# Altium schematic symbol library Thunderbolt GPIO.SCHLIB: 6 symbols
Pins are listed as number, name and electrical type; pins without a type are passive.

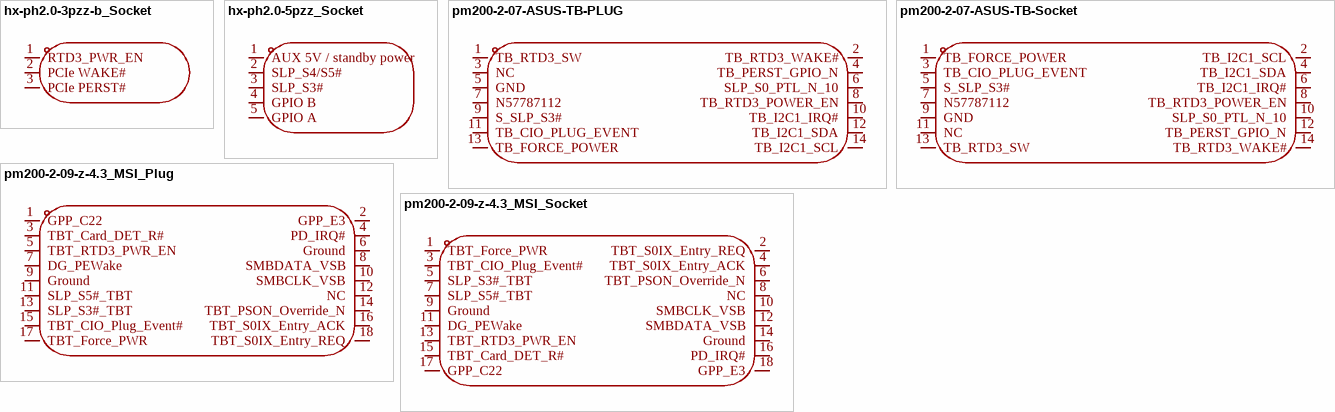
[diagram p0: symbols hx-ph2.0-3pzz-b_Socket to pm200-2-09-z-4.3_MSI_Socket]

## hx-ph2.0-3pzz-b_Socket
designator CN??, comment hx-ph2.0-3pzz-b  (value not drawn)
插针结构:1x3P;间距:2mm;安装方式:直插;参考系列:PH;总PIN数:3P;排数:1;每排PIN数:3;行距:-;额定电流:2A;触头材质:黄铜;触头镀层:锡;工作温度:-25℃~+85℃;; Manufacturer: hanxia(韩下); AddInBom: yes; Pins Structure: 1x3P; Pitch: 2mm; Reference Series: PH; Number of PINs Per Row: 3; Current Rating: 2A; Voltage Rating: 250V; Plastic Material: PA66; Flame Retardant Rating: UL94V-0; Symbol: HX-PH2.0-3PZZ-B; LCSC Part Name: 1x3P 间距:2mm 直插 系列:PH; SupplierPart: C49009993; ManufacturerPart: HX-PH2.0-3PZZ-B; Supplier Footprint: 插件,P=2mm; JLCPCB Part Class: Extended Part; Datasheet: https://item.szlcsc.com/datasheet/HX-PH2.0-3PZZ-B/51365914.html; Supplier: LCSC; ConvertToPcb: yes; FootprintName: CONN-TH_HX-PH2.0-3PZZ-B; Mounting Type: 直插; Number of Pins: 3P; Number of Rows: 1; Row Spacing: -; Contact Material: 黄铜; Contact Plating: 锡; Operating Temperature: -25℃~+85℃; Supplementary Features: -; Color: 黑色; Z-Height of the Board: -; X-Length of Bottom Edge on Board (Spacing Line): -; Y-Width of Bottom Edge on Board: -
footprint CONN-TH_HX-PH2.0-3PZZ-B
pins: 1 RTD3_PWR_EN, 2 PCIe WAKE#, 3 PCIe PERST#

## hx-ph2.0-5pzz_Socket
designator CN??, comment hx-ph2.0-5pzz  (value not drawn)
插针结构:1x5P;间距:2mm;安装方式:直插;参考系列:PH;总PIN数:5P;排数:1;每排PIN数:5;行距:-;额定电流:2A;触头材质:黄铜;触头镀层:锡;工作温度:-25℃~+85℃;; Manufacturer: hanxia(韩下); AddInBom: yes; Pins Structure: 1x5P; Pitch: 2mm; Reference Series: PH; Number of PINs Per Row: 5; Current Rating: 2A; Voltage Rating: 250V; Plastic Material: PA66; Flame Retardant Rating: UL94V-0; Symbol: HX-PH2.0-5PZZ; LCSC Part Name: 1x5P 间距:2mm 直插 系列:PH; SupplierPart: C48641620; ManufacturerPart: HX-PH2.0-5PZZ; Supplier Footprint: 插件,P=2mm; JLCPCB Part Class: Extended Part; Datasheet: https://item.szlcsc.com/datasheet/HX-PH2.0-5PZZ/50919866.html; Supplier: LCSC; ConvertToPcb: yes; FootprintName: CONN-TH_HX-PH2.0-5PZZ; Mounting Type: 直插; Number of Pins: 5P; Number of Rows: 1; Row Spacing: -; Contact Material: 黄铜; Contact Plating: 锡; Operating Temperature: -25℃~+85℃; Color: 白色
footprint CONN-TH_HX-PH2.0-5PZZ
pins: 1 AUX 5V / standby power, 2 SLP_S4/S5#, 3 SLP_S3#, 4 GPIO B, 5 GPIO A

## pm200-2-07-ASUS-TB-PLUG
designator U??, comment pm200-2-07-s-4.3  (value not drawn)
插孔结构:2x7P;间距:2mm;行距:2mm;圆孔/方孔:方孔;安装方式:立贴;排数:双排;总孔位数:14P;额定电流:1.5A;插孔方向:顶部;塑高:4.3mm;触头材质:黄铜;工作温度:-40℃~+105℃;; Manufacturer: HCTL(华灿天禄); AddInBom: yes; Holes Structure: 2x7P; Pitch: 2mm; Circular Hole / Square Hole: 方孔; Number of Positions: 14P; Current Rating: 1.5A; Holes Direction: 顶部; Symbol: PM200-2-07-S-4.3; LCSC Part Name: 2x7P 间距:2mm 立贴; SupplierPart: C3975171; ManufacturerPart: PM200-2-07-S-4.3; Supplier Footprint: SMD,P=2mm; JLCPCB Part Class: Extended Part; Datasheet: https://item.szlcsc.com/datasheet/PM200-2-07-S-4.3/4543722.html; Supplier: LCSC; ConvertToPcb: yes; FootprintName: HDR-SMD_14P-P2.00-V-F-R2-C7-LS6.5-A; Row Spacing: 2mm; Mounting Type: 立贴; Number of Rows: 双排; Insulation Height: 4.3mm; Contact Material: 黄铜; Operating Temperature: -40℃~+105℃
footprint HDR-SMD_14P-P2.00-V-F-R2-C7-LS6.5-A
pins: 1 TB_RTD3_SW, 2 TB_RTD3_WAKE#, 3 NC, 4 TB_PERST_GPIO_N, 5 GND, 6 SLP_S0_PTL_N_10, 7 N57787112, 8 TB_RTD3_POWER_EN, 9 S_SLP_S3#, 10 TB_I2C1_IRQ#, 11 TB_CIO_PLUG_EVENT, 12 TB_I2C1_SDA, 13 TB_FORCE_POWER, 14 TB_I2C1_SCL

## pm200-2-07-ASUS-TB-Socket
designator U??, comment pm200-2-07-s-4.3  (value not drawn)
插孔结构:2x7P;间距:2mm;行距:2mm;圆孔/方孔:方孔;安装方式:立贴;排数:双排;总孔位数:14P;额定电流:1.5A;插孔方向:顶部;塑高:4.3mm;触头材质:黄铜;工作温度:-40℃~+105℃;; Manufacturer: HCTL(华灿天禄); AddInBom: yes; Holes Structure: 2x7P; Pitch: 2mm; Circular Hole / Square Hole: 方孔; Number of Positions: 14P; Current Rating: 1.5A; Holes Direction: 顶部; Symbol: PM200-2-07-S-4.3; LCSC Part Name: 2x7P 间距:2mm 立贴; SupplierPart: C3975171; ManufacturerPart: PM200-2-07-S-4.3; Supplier Footprint: SMD,P=2mm; JLCPCB Part Class: Extended Part; Datasheet: https://item.szlcsc.com/datasheet/PM200-2-07-S-4.3/4543722.html; Supplier: LCSC; ConvertToPcb: yes; FootprintName: HDR-SMD_14P-P2.00-V-F-R2-C7-LS6.5-A; Row Spacing: 2mm; Mounting Type: 立贴; Number of Rows: 双排; Insulation Height: 4.3mm; Contact Material: 黄铜; Operating Temperature: -40℃~+105℃
footprint HDR-SMD_14P-P2.00-V-F-R2-C7-LS6.5-A
pins: 1 TB_FORCE_POWER, 2 TB_I2C1_SCL, 3 TB_CIO_PLUG_EVENT, 4 TB_I2C1_SDA, 5 S_SLP_S3#, 6 TB_I2C1_IRQ#, 7 N57787112, 8 TB_RTD3_POWER_EN, 9 GND, 10 SLP_S0_PTL_N_10, 11 NC, 12 TB_PERST_GPIO_N, 13 TB_RTD3_SW, 14 TB_RTD3_WAKE#

## pm200-2-09-z-4.3_MSI_Plug
designator U??, comment pm200-2-09-z-4.3_c3012173  (value not drawn)
插孔结构:2x9P;间距:2mm;行距:2mm;圆孔/方孔:方孔;安装方式:直插;排数:双排;总孔位数:18P;额定电流:1.5A;插孔方向:顶部;塑高:4.3mm;触头材质:黄铜;工作温度:-40℃~+105℃;; Manufacturer: HCTL(华灿天禄); AddInBom: yes; ModelId: 27f2729bd6294aaf8e872fe91d00ea97; ModelName: HDR-TH_18P-P2.00-V-F-R2-C9-S2.00-1; ModelTransform: 732.282,177.165,0,0,0,0,0,0,-118.11; Holes Structure: 2x9P; Pitch: 2mm; Circular Hole / Square Hole: 方孔; Number of Positions: 18P; Current Rating: 1.5A; Holes Direction: 顶部; Symbol: PM200-2-09-Z-4.3_C3012173; LCSC Part Name: 2x9P 间距:2mm 直插; SupplierPart: C3012173; ManufacturerPart: PM200-2-09-Z-4.3; Supplier Footprint: 插件,P=2mm; JLCPCB Part Class: Extended Part; Datasheet: https://item.szlcsc.com/datasheet/PM200-2-09-Z-4.3/3516644.html; Supplier: LCSC; ConvertToPcb: yes; FootprintName: HDR-TH_18P-P2.00-V-F-R2-C9-S2.00-1; Row Spacing: 2mm; Mounting Type: 直插; Number of Rows: 双排; Insulation Height: 4.3mm; Contact Material: 黄铜; Operating Temperature: -40℃~+105℃
footprint HDR-TH_18P-P2.00-V-F-R2-C9-S2.00-1
pins: 1 GPP_C22, 2 GPP_E3, 3 TBT_Card_DET_R#, 4 PD_IRQ#, 5 TBT_RTD3_PWR_EN, 6 Ground, 7 DG_PEWake, 8 SMBDATA_VSB, 9 Ground, 10 SMBCLK_VSB, 11 SLP_S5#_TBT, 12 NC, 13 SLP_S3#_TBT, 14 TBT_PSON_Override_N, 15 TBT_CIO_Plug_Event#, 16 TBT_S0IX_Entry_ACK, 17 TBT_Force_PWR, 18 TBT_S0IX_Entry_REQ

## pm200-2-09-z-4.3_MSI_Socket
designator U??, comment pm200-2-09-z-4.3_c3012173  (value not drawn)
插孔结构:2x9P;间距:2mm;行距:2mm;圆孔/方孔:方孔;安装方式:直插;排数:双排;总孔位数:18P;额定电流:1.5A;插孔方向:顶部;塑高:4.3mm;触头材质:黄铜;工作温度:-40℃~+105℃;; Manufacturer: HCTL(华灿天禄); AddInBom: yes; ModelId: 27f2729bd6294aaf8e872fe91d00ea97; ModelName: HDR-TH_18P-P2.00-V-F-R2-C9-S2.00-1; ModelTransform: 732.282,177.165,0,0,0,0,0,0,-118.11; Holes Structure: 2x9P; Pitch: 2mm; Circular Hole / Square Hole: 方孔; Number of Positions: 18P; Current Rating: 1.5A; Holes Direction: 顶部; Symbol: PM200-2-09-Z-4.3_C3012173; LCSC Part Name: 2x9P 间距:2mm 直插; SupplierPart: C3012173; ManufacturerPart: PM200-2-09-Z-4.3; Supplier Footprint: 插件,P=2mm; JLCPCB Part Class: Extended Part; Datasheet: https://item.szlcsc.com/datasheet/PM200-2-09-Z-4.3/3516644.html; Supplier: LCSC; ConvertToPcb: yes; FootprintName: HDR-TH_18P-P2.00-V-F-R2-C9-S2.00-1; Row Spacing: 2mm; Mounting Type: 直插; Number of Rows: 双排; Insulation Height: 4.3mm; Contact Material: 黄铜; Operating Temperature: -40℃~+105℃
footprint HDR-TH_18P-P2.00-V-F-R2-C9-S2.00-1
pins: 1 TBT_Force_PWR, 2 TBT_S0IX_Entry_REQ, 3 TBT_CIO_Plug_Event#, 4 TBT_S0IX_Entry_ACK, 5 SLP_S3#_TBT, 6 TBT_PSON_Override_N, 7 SLP_S5#_TBT, 8 NC, 9 Ground, 10 SMBCLK_VSB, 11 DG_PEWake, 12 SMBDATA_VSB, 13 TBT_RTD3_PWR_EN, 14 Ground, 15 TBT_Card_DET_R#, 16 PD_IRQ#, 17 GPP_C22, 18 GPP_E3